# Altium schematic symbol library TPD4E1U06DCKR.SchLib: 1 symbol
Pins are listed as number, name and electrical type; pins without a type are passive.

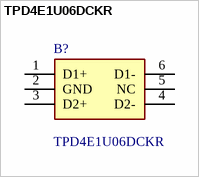
[diagram p0: symbol TPD4E1U06DCKR]

## TPD4E1U06DCKR
designator B?
Quad-Channel High-Speed ESD Protection Device; Manufacturer_Name: Texas Instruments; Geometry.Height: 1.1mm; Manufacturer_Part_Number: TPD4E1U06DCKR; Mouser Part Number: 595-TPD4E1U06DCKR; Mouser Price/Stock: https://www.mouser.co.uk/ProductDetail/Texas-Instruments/TPD4E1U06DCKR?qs=FBI%252BX3tnPf27UOVCu86Dnw%3D%3D; Arrow Part Number: TPD4E1U06DCKR; Arrow Price/Stock: https://www.arrow.com/en/products/tpd4e1u06dckr/texas-instruments?utm_currency=USD&region=nac; Datasheet Link: http://www.ti.com/lit/gpn/tpd4e1u06
footprint SOT65P210X110-6N
pins: 1 D1+, 2 GND, 3 D2+, 4 D2-, 5 NC, 6 D1-